# Altium schematic symbol library Deck Versal.SchLib: 25 symbols
Pins are listed as number, name and electrical type; pins without a type are passive.

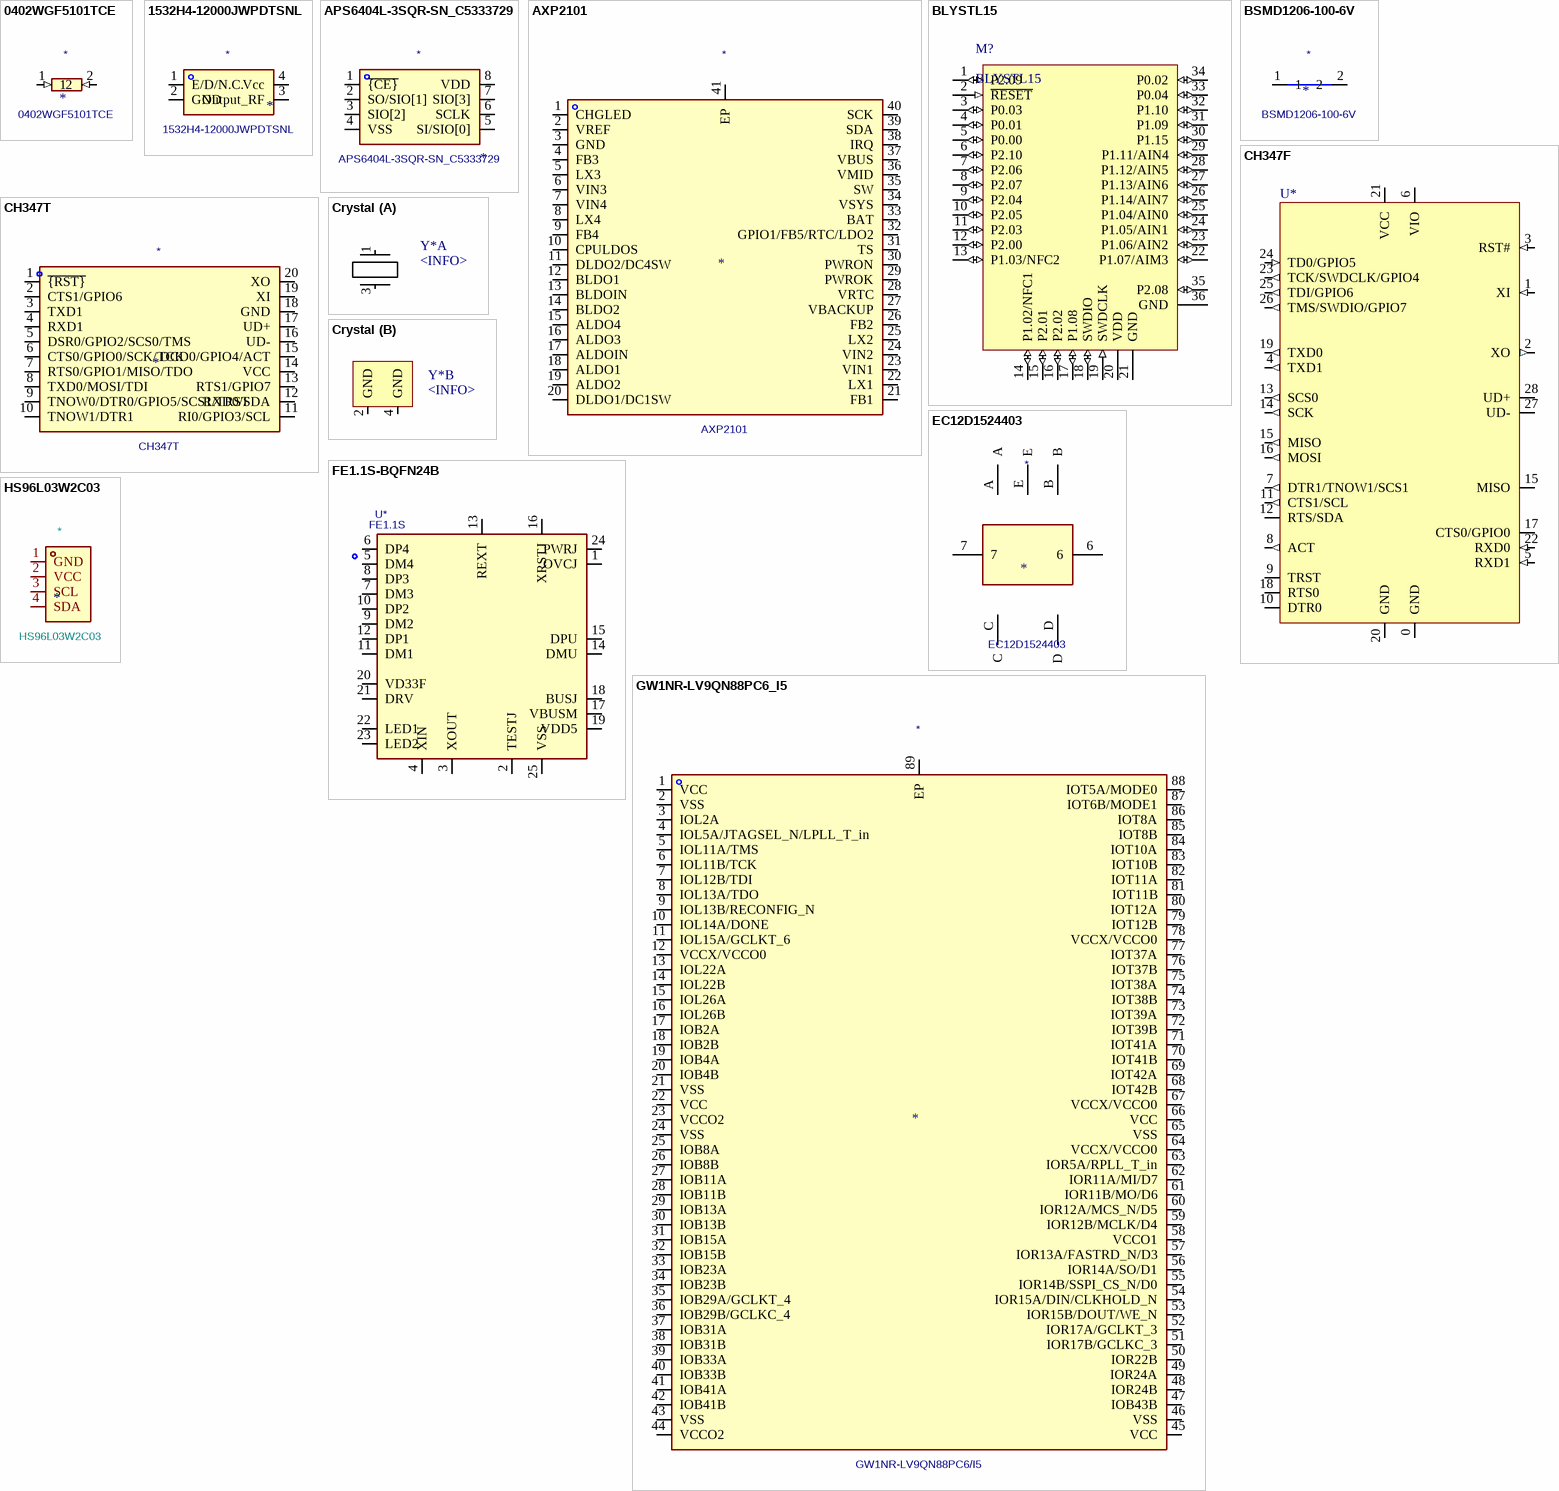
[diagram p0: symbols 0402WGF5101TCE to HS96L03W2C03]

## 0402WGF5101TCE
designator *  value 0402WGF5101TCE
Manufacturer: UNI-ROYAL(厚声); ki_keywords: Resistors; ki_description: 5.1KΩ (5101) ±1%; Footprint: easyeda2kicad:R0402; Supplier: https://lcsc.com/product-detail/Chip-Resistor-Surface-Mount-UniOhm_5-1KR-5101-1_C25905.html; MPN: 0402WGF5101TCE; LCSC Part: C25905
footprint R0402
pins: 1 (in), 2 (in)

## 1532H4-12000JWPDTSNL
designator *  value 1532H4-12000JWPDTSNL
Manufacturer: HCI(杭晶); ki_keywords: Oscillators; Footprint: easyeda2kicad:OSC-SMD_4P-L3.2-W2.5-BL; Supplier: https://www.lcsc.com/datasheet/C5383163.pdf; MPN: 1532H4-12000JWPDTSNL; LCSC Part: C5383163
footprint OSC-SMD_4P-L3.2-W2.5-BL
pins: 1 E/D/N.C., 2 GND, 3 Output_RF, 4 Vcc

## APS6404L-3SQR-SN_C5333729
designator *  value APS6404L-3SQR-SN_C5333729
Manufacturer: Apmemory; MPN: APS6404L-3SQR-SN; ki_keywords: DRAM; Footprint: easyeda2kicad:SOIC-8_L4.9-W3.9-P1.27-LS6.0-BL; Supplier: https://www.lcsc.com/datasheet/C5333729.pdf; LCSC Part: C5333729
footprint SOIC-8_L4.9-W3.9-P1.27-LS6.0-BL
pins: 1 ~{{CE}}, 2 SO/SIO[1], 3 SIO[2], 4 VSS, 5 SI/SIO[0], 6 SCLK, 7 SIO[3], 8 VDD

## AXP2101
designator *  value AXP2101
Manufacturer: x-powers(芯智汇); ki_keywords: Microcontroller Units (MCUs/MPUs/SOCs); Footprint: easyeda2kicad:QFN-40_L5.0-W5.0-P0.40-TL-EP3.4; Supplier: https://www.lcsc.com/datasheet/C3036461.pdf; MPN: AXP2101; LCSC Part: C3036461
footprint QFN-40_L5.0-W5.0-P0.40-TL-EP3.4
pins: 1 CHGLED, 2 VREF, 3 GND, 4 FB3, 5 LX3, 6 VIN3, 7 VIN4, 8 LX4, 9 FB4, 10 CPULDOS, 11 DLDO2/DC4SW, 12 BLDO1, 13 BLDOIN, 14 BLDO2, 15 ALDO4, 16 ALDO3, 17 ALDOIN, 18 ALDO1, 19 ALDO2, 20 DLDO1/DC1SW, 21 FB1, 22 LX1, 23 VIN1, 24 VIN2, 25 LX2, 26 FB2, 27 VBACKUP, 28 VRTC, 29 PWROK, 30 PWRON, 31 TS, 32 GPIO1/FB5/RTC/LDO2, 33 BAT, 34 VSYS, 35 SW, 36 VMID, 37 VBUS, 38 IRQ, 39 SDA, 40 SCK, 41 EP

## BLYSTL15
designator M?
Nordic  nRF54L15 - BLE module
footprint BLYSTL15 (nRF54L15 Bluetooth LE Module)
pins: 1 P2.09 (io), 2 ~{RESET} (in), 3 P0.03 (io), 4 P0.01 (io), 5 P0.00 (io), 6 P2.10 (io), 7 P2.06 (io), 8 P2.07 (io), 9 P2.04 (io), 10 P2.05 (io), 11 P2.03 (io), 12 P2.00 (io), 13 P1.03/NFC2 (io), 14 P1.02/NFC1 (io), 15 P2.01 (io), 16 P2.02 (io), 17 P1.08 (io), 18 SWDIO (io), 19 SWDCLK (in), 20 VDD (power), 21 GND, 22 P1.07/AIM3 (io), 23 P1.06/AIN2 (io), 24 P1.05/AIN1 (io), 25 P1.04/AIN0 (io), 26 P1.14/AIN7 (io), 27 P1.13/AIN6 (io), 28 P1.12/AIN5 (io), 29 P1.11/AIN4 (io), 30 P1.15 (io), 31 P1.09 (io), 32 P1.10 (io), 33 P0.04 (io), 34 P0.02 (io), 35 P2.08 (io), 36 GND

## BSMD1206-100-6V
designator *  value BSMD1206-100-6V
Manufacturer: BHFUSE(佰宏); ki_keywords: Resettable Fuses; Footprint: easyeda2kicad:F1206; Supplier: https://lcsc.com/product-detail/PTC-Resettable-Fuses_BHFUSE-BSMD1206-100-6V_C883129.html; MPN: BSMD1206-100-6V; LCSC Part: C883129
footprint F1206
pins: 1, 2

## CH347F
designator U*
-40℃~+85℃ 180Ω 20pF 8MHz Crystal Oscillator ±10ppm ±20ppm SMD3225-4P Crystals ROHS
footprint QFN40P400X400X80_HS-29N (QFN, 28-Leads, Body 4.00x4.00mm, Pitch 0.40mm, Thermal Pad 2.70x2.70mm, IPC Medium Density)
pins: 0 GND, 1 XI (in), 2 XO (out), 3 RST# (in), 4 TXD1 (out), 5 RXD1 (in), 6 VIO, 7 DTR1/TNOW1/SCS1 (out), 8 ACT (out), 9 TRST, 10 DTR0, 11 CTS1/SCL (out), 12 RTS/SDA (io), 13 SCS0 (out), 14 SCK (out), 15 MISO, 15 MISO (out), 16 MOSI (out), 17 CTS0/GPIO0, 18 RTS0, 19 TXD0 (out), 20 GND, 21 VCC, 22 RXD0 (in), 23 TCK/SWDCLK/GPIO4 (out), 24 TD0/GPIO5 (in), 25 TDI/GPIO6 (out), 26 TMS/SWDIO/GPIO7 (out), 27 UD-, 28 UD+

## CH347T
designator *  value CH347T
Manufacturer: WCH(南京沁恒); ki_keywords: USB ICs; Footprint: easyeda2kicad:TSSOP-20_L6.5-W4.4-P0.65-LS6.4-BL; Supplier: https://www.lcsc.com/datasheet/C5122332.pdf; MPN: CH347T; LCSC Part: C5122332
footprint TSSOP-20_L6.5-W4.4-P0.65-LS6.4-BL
pins: 1 ~{{RST}}, 2 CTS1/GPIO6, 3 TXD1, 4 RXD1, 5 DSR0/GPIO2/SCS0/TMS, 6 CTS0/GPIO0/SCK/TCK, 7 RTS0/GPIO1/MISO/TDO, 8 TXD0/MOSI/TDI, 9 TNOW0/DTR0/GPIO5/SCS1/TRST, 10 TNOW1/DTR1, 11 RI0/GPIO3/SCL, 12 RXD0/SDA, 13 RTS1/GPIO7, 14 VCC, 15 DCD0/GPIO4/ACT, 16 UD-, 17 UD+, 18 GND, 19 XI, 20 XO

## Crystal
designator Y*, comment <INFO>
footprint X32258MSB4SI (-40℃~+85℃ 180Ω 20pF 8MHz Crystal Oscillator ±10ppm ±20ppm SMD3225-4P Crystals ROHS)
part A pins: 1, 3
part B pins: 2 GND, 4 GND

## EC12D1524403
designator *  value EC12D1524403
Manufacturer: ALPSALPINE(阿尔卑斯阿尔派); ki_keywords: Rotary Encoders; Footprint: easyeda2kicad:SW-TH_EC12D1524403; Supplier: https://lcsc.com/product-detail/Coded-Rotary-Switches_ALPS_EC12D1524403_EC12D1524403_C112349.html; MPN: EC12D1524403; LCSC Part: C112349
footprint SW-TH_EC12D1524403
pins: 6, 7, A, B, C, D, E

## FE1.1S-BQFN24B
designator U*  value FE1.1S  (hidden comment: *)
Manufacturer: TERMINUS(汤铭科技); MPN: FE1.1S-BQFN24B; ki_keywords: USB ICs; Footprint: easyeda2kicad:WQFN-24_L4.0-W4.0-P0.50-TL-EP2.7; Supplier: https://www.lcsc.com/datasheet/C6776948.pdf; LCSC Part: C6776948
footprint WQFN-24_L4.0-W4.0-P0.50-TL-EP2.7
pins: 1 OVCJ, 2 TESTJ, 3 XOUT, 4 XIN, 5 DM4, 6 DP4, 7 DM3, 8 DP3, 9 DM2, 10 DP2, 11 DM1, 12 DP1, 13 REXT, 14 DMU, 15 DPU, 16 XRSTJ, 17 VBUSM, 18 BUSJ, 19 VDD5, 20 VD33F, 21 DRV, 22 LED1, 23 LED2, 24 PWRJ, 25 VSS

## GW1NR-LV9QN88PC6_I5
designator *  value GW1NR-LV9QN88PC6/I5
Manufacturer: GOWIN(高云); Footprint: easyeda2kicad:QFN-88_L10.0-W10.0-P0.40-BL-EP7.0; Supplier: https://www.lcsc.com/datasheet/C5799578.pdf; MPN: GW1NR-LV9QN88PC6/I5; LCSC Part: C5799578
footprint QFN-88_L10.0-W10.0-P0.40-BL-EP7.0
pins: 1 VCC, 2 VSS, 3 IOL2A, 4 IOL5A/JTAGSEL_N/LPLL_T_in, 5 IOL11A/TMS, 6 IOL11B/TCK, 7 IOL12B/TDI, 8 IOL13A/TDO, 9 IOL13B/RECONFIG_N, 10 IOL14A/DONE, 11 IOL15A/GCLKT_6, 12 VCCX/VCCO0, 13 IOL22A, 14 IOL22B, 15 IOL26A, 16 IOL26B, 17 IOB2A, 18 IOB2B, 19 IOB4A, 20 IOB4B, 21 VSS, 22 VCC, 23 VCCO2, 24 VSS, 25 IOB8A, 26 IOB8B, 27 IOB11A, 28 IOB11B, 29 IOB13A, 30 IOB13B, 31 IOB15A, 32 IOB15B, 33 IOB23A, 34 IOB23B, 35 IOB29A/GCLKT_4, 36 IOB29B/GCLKC_4, 37 IOB31A, 38 IOB31B, 39 IOB33A, 40 IOB33B, 41 IOB41A, 42 IOB41B, 43 VSS, 44 VCCO2, 45 VCC, 46 VSS, 47 IOB43B, 48 IOR24B, 49 IOR24A, 50 IOR22B, 51 IOR17B/GCLKC_3, 52 IOR17A/GCLKT_3, 53 IOR15B/DOUT/WE_N, 54 IOR15A/DIN/CLKHOLD_N, 55 IOR14B/SSPI_CS_N/D0, 56 IOR14A/SO/D1, 57 IOR13A/FASTRD_N/D3, 58 VCCO1, 59 IOR12B/MCLK/D4, 60 IOR12A/MCS_N/D5, 61 IOR11B/MO/D6, 62 IOR11A/MI/D7, 63 IOR5A/RPLL_T_in, 64 VCCX/VCCO0, 65 VSS, 66 VCC, 67 VCCX/VCCO0, 68 IOT42B, 69 IOT42A, 70 IOT41B, 71 IOT41A, 72 IOT39B, 73 IOT39A, 74 IOT38B, 75 IOT38A, 76 IOT37B, 77 IOT37A, 78 VCCX/VCCO0, 79 IOT12B, 80 IOT12A, 81 IOT11B, 82 IOT11A, 83 IOT10B, 84 IOT10A, 85 IOT8B, 86 IOT8A, 87 IOT6B/MODE1, 88 IOT5A/MODE0, 89 EP

## HS96L03W2C03
designator *  value HS96L03W2C03
Manufacturer: HS(汉昇); ki_keywords: OLED Displays Modules; Footprint: easyeda2kicad:OLED-TH_L27.8-W27.2-P2.54_C9900033791; Supplier: https://www.lcsc.com/datasheet/C5248080.pdf; MPN: HS96L03W2C03; LCSC Part: C5248080
footprint OLED-TH_L27.8-W27.2-P2.54_C9900033791
pins: 1 GND, 2 VCC, 3 SCL, 4 SDA

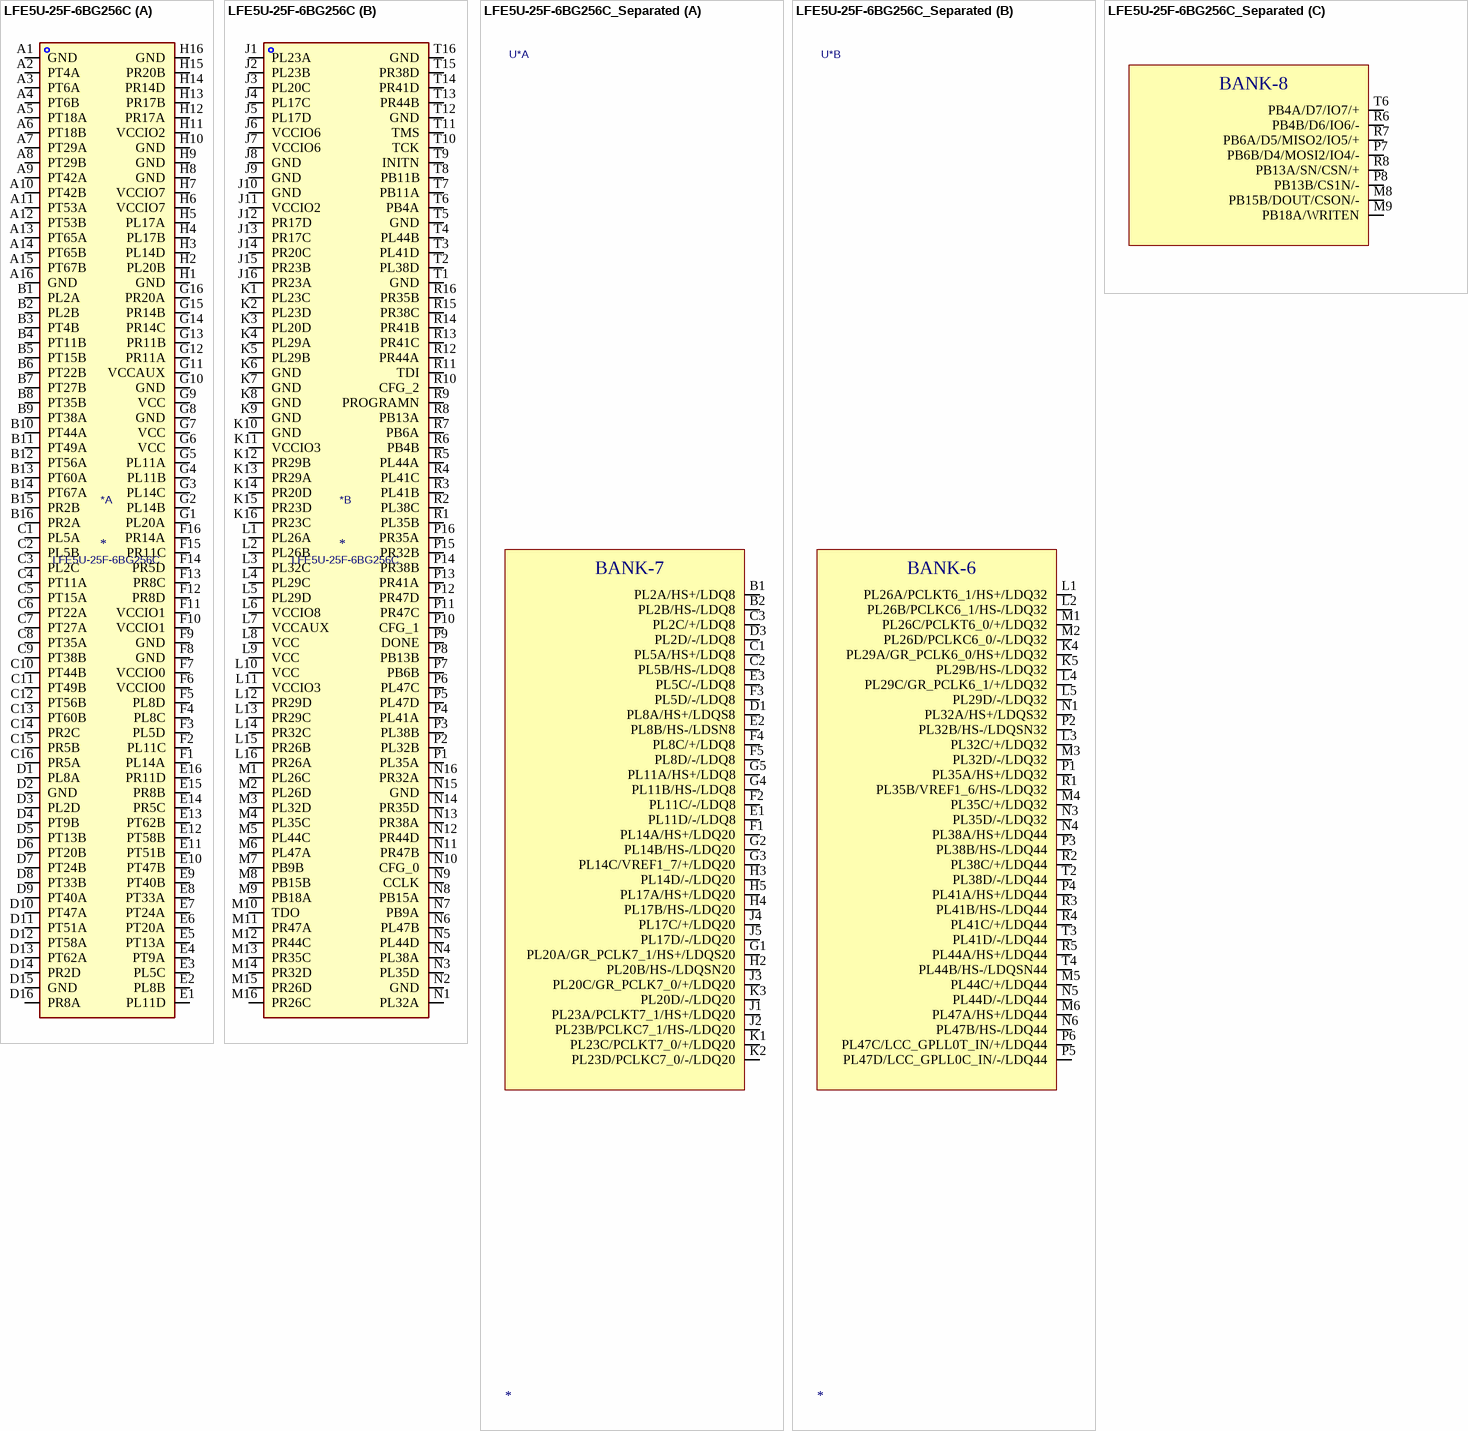
[diagram p1: symbols LFE5U-25F-6BG256C to LFE5U-25F-6BG256C_Separated]

## LFE5U-25F-6BG256C
designator *  value LFE5U-25F-6BG256C
Manufacturer: LATTICE(莱迪思); ki_keywords: CPLD/FPGA; Footprint: easyeda2kicad:CABGA-256_L14.0-W14.0-R16-C16-P0.80-TL; Supplier: https://www.lcsc.com/datasheet/C1521614.pdf; MPN: LFE5U-25F-6BG256C; LCSC Part: C1521614
footprint CABGA-256_L14.0-W14.0-R16-C16-P0.80-TL
part A pins: A1 GND, A2 PT4A, A3 PT6A, A4 PT6B, A5 PT18A, A6 PT18B, A7 PT29A, A8 PT29B, A9 PT42A, A10 PT42B, A11 PT53A, A12 PT53B, A13 PT65A, A14 PT65B, A15 PT67B, A16 GND, B1 PL2A, B2 PL2B, B3 PT4B, B4 PT11B, B5 PT15B, B6 PT22B, B7 PT27B, B8 PT35B, B9 PT38A, B10 PT44A, B11 PT49A, B12 PT56A, B13 PT60A, B14 PT67A, B15 PR2B, B16 PR2A, C1 PL5A, C2 PL5B, C3 PL2C, C4 PT11A, C5 PT15A, C6 PT22A, C7 PT27A, C8 PT35A, C9 PT38B, C10 PT44B, C11 PT49B, C12 PT56B, C13 PT60B, C14 PR2C, C15 PR5B, C16 PR5A, D1 PL8A, D2 GND, D3 PL2D, D4 PT9B, D5 PT13B, D6 PT20B, D7 PT24B, D8 PT33B, D9 PT40A, D10 PT47A, D11 PT51A, D12 PT58A, D13 PT62A, D14 PR2D, D15 GND, D16 PR8A, E1 PL11D, E2 PL8B, E3 PL5C, E4 PT9A, E5 PT13A, E6 PT20A, E7 PT24A, E8 PT33A, E9 PT40B, E10 PT47B, E11 PT51B, E12 PT58B, E13 PT62B, E14 PR5C, E15 PR8B, E16 PR11D, F1 PL14A, F2 PL11C, F3 PL5D, F4 PL8C, F5 PL8D, F6 VCCIO0, F7 VCCIO0, F8 GND, F9 GND, F10 VCCIO1, F11 VCCIO1, F12 PR8D, F13 PR8C, F14 PR5D, F15 PR11C, F16 PR14A, G1 PL20A, G2 PL14B, G3 PL14C, G4 PL11B, G5 PL11A, G6 VCC, G7 VCC, G8 GND, G9 VCC, G10 GND, G11 VCCAUX, G12 PR11A, G13 PR11B, G14 PR14C, G15 PR14B, G16 PR20A, H1 GND, H2 PL20B, H3 PL14D, H4 PL17B, H5 PL17A, H6 VCCIO7, H7 VCCIO7, H8 GND, H9 GND, H10 GND, H11 VCCIO2, H12 PR17A, H13 PR17B, H14 PR14D, H15 PR20B, H16 GND
part B pins: J1 PL23A, J2 PL23B, J3 PL20C, J4 PL17C, J5 PL17D, J6 VCCIO6, J7 VCCIO6, J8 GND, J9 GND, J10 GND, J11 VCCIO2, J12 PR17D, J13 PR17C, J14 PR20C, J15 PR23B, J16 PR23A, K1 PL23C, K2 PL23D, K3 PL20D, K4 PL29A, K5 PL29B, K6 GND, K7 GND, K8 GND, K9 GND, K10 GND, K11 VCCIO3, K12 PR29B, K13 PR29A, K14 PR20D, K15 PR23D, K16 PR23C, L1 PL26A, L2 PL26B, L3 PL32C, L4 PL29C, L5 PL29D, L6 VCCIO8, L7 VCCAUX, L8 VCC, L9 VCC, L10 VCC, L11 VCCIO3, L12 PR29D, L13 PR29C, L14 PR32C, L15 PR26B, L16 PR26A, M1 PL26C, M2 PL26D, M3 PL32D, M4 PL35C, M5 PL44C, M6 PL47A, M7 PB9B, M8 PB15B, M9 PB18A, M10 TDO, M11 PR47A, M12 PR44C, M13 PR35C, M14 PR32D, M15 PR26D, M16 PR26C, N1 PL32A, N2 GND, N3 PL35D, N4 PL38A, N5 PL44D, N6 PL47B, N7 PB9A, N8 PB15A, N9 CCLK, N10 CFG_0, N11 PR47B, N12 PR44D, N13 PR38A, N14 PR35D, N15 GND, N16 PR32A, P1 PL35A, P2 PL32B, P3 PL38B, P4 PL41A, P5 PL47D, P6 PL47C, P7 PB6B, P8 PB13B, P9 DONE, P10 CFG_1, P11 PR47C, P12 PR47D, P13 PR41A, P14 PR38B, P15 PR32B, P16 PR35A, R1 PL35B, R2 PL38C, R3 PL41B, R4 PL41C, R5 PL44A, R6 PB4B, R7 PB6A, R8 PB13A, R9 PROGRAMN, R10 CFG_2, R11 TDI, R12 PR44A, R13 PR41C, R14 PR41B, R15 PR38C, R16 PR35B, T1 GND, T2 PL38D, T3 PL41D, T4 PL44B, T5 GND, T6 PB4A, T7 PB11A, T8 PB11B, T9 INITN, T10 TCK, T11 TMS, T12 GND, T13 PR44B, T14 PR41D, T15 PR38D, T16 GND

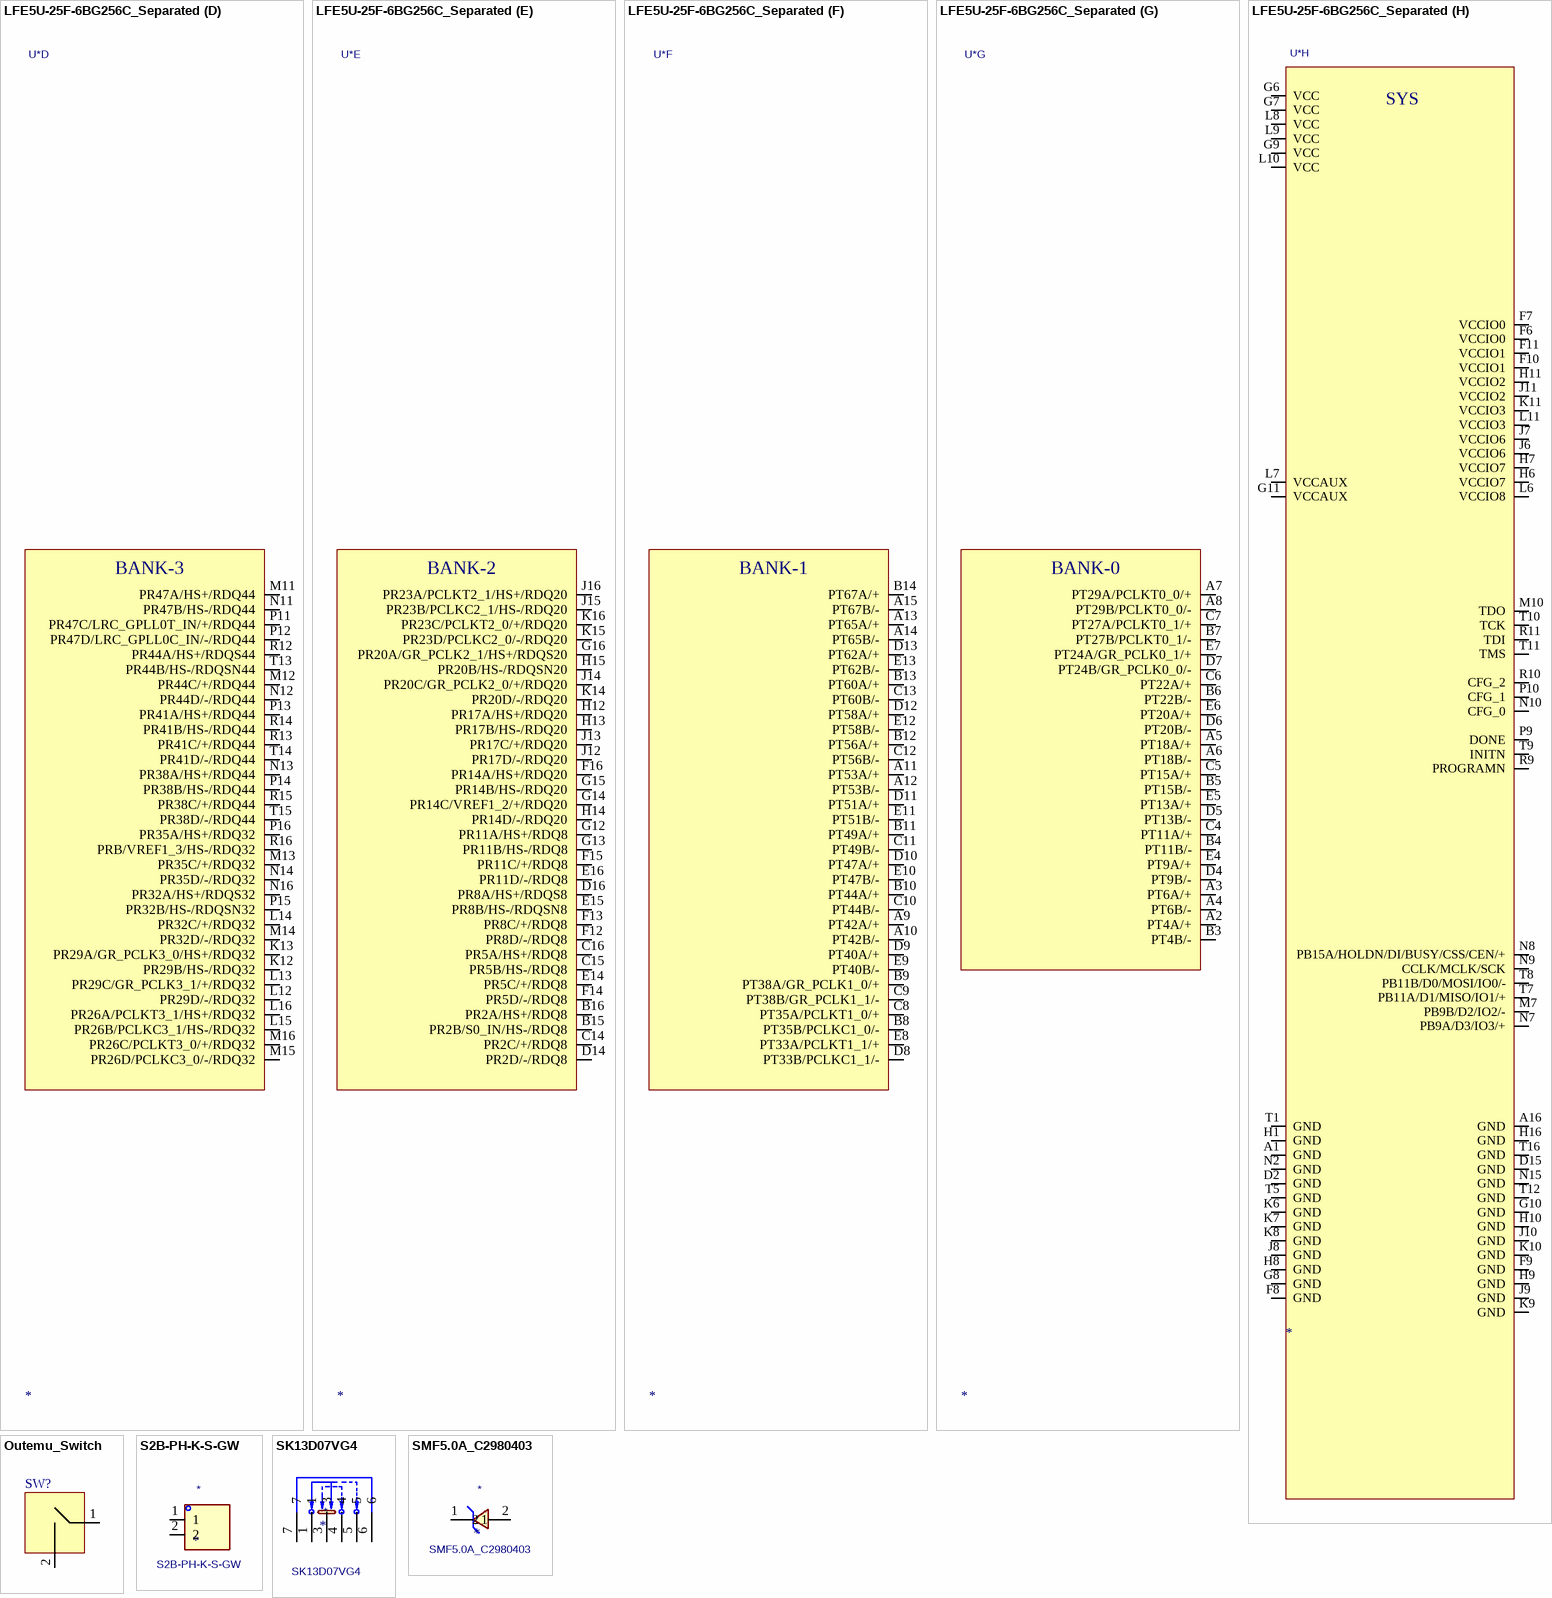
[diagram p2: symbols LFE5U-25F-6BG256C_Separated to SMF5.0A_C2980403]

## LFE5U-25F-6BG256C_Separated
designator U*
Manufacturer: LATTICE(莱迪思); MPN: LFE5U-25F-6BG256C; ki_keywords: CPLD/FPGA; Footprint: easyeda2kicad:CABGA-256_L14.0-W14.0-R16-C16-P0.80-TL; Supplier: https://www.lcsc.com/datasheet/C1521614.pdf; LCSC Part: C1521614
footprint CABGA-256_L14.0-W14.0-R16-C16-P0.80-TL
part A pins: B1 PL2A/HS+/LDQ8, B2 PL2B/HS-/LDQ8, C1 PL5A/HS+/LDQ8, C2 PL5B/HS-/LDQ8, C3 PL2C/+/LDQ8, D1 PL8A/HS+/LDQS8, D3 PL2D/-/LDQ8, E1 PL11D/-/LDQ8, E2 PL8B/HS-/LDSN8, E3 PL5C/-/LDQ8, F1 PL14A/HS+/LDQ20, F2 PL11C/-/LDQ8, F3 PL5D/-/LDQ8, F4 PL8C/+/LDQ8, F5 PL8D/-/LDQ8, G1 PL20A/GR_PCLK7_1/HS+/LDQS20, G2 PL14B/HS-/LDQ20, G3 PL14C/VREF1_7/+/LDQ20, G4 PL11B/HS-/LDQ8, G5 PL11A/HS+/LDQ8, H2 PL20B/HS-/LDQSN20, H3 PL14D/-/LDQ20, H4 PL17B/HS-/LDQ20, H5 PL17A/HS+/LDQ20, J1 PL23A/PCLKT7_1/HS+/LDQ20, J2 PL23B/PCLKC7_1/HS-/LDQ20, J3 PL20C/GR_PCLK7_0/+/LDQ20, J4 PL17C/+/LDQ20, J5 PL17D/-/LDQ20, K1 PL23C/PCLKT7_0/+/LDQ20, K2 PL23D/PCLKC7_0/-/LDQ20, K3 PL20D/-/LDQ20
part B pins: K4 PL29A/GR_PCLK6_0/HS+/LDQ32, K5 PL29B/HS-/LDQ32, L1 PL26A/PCLKT6_1/HS+/LDQ32, L2 PL26B/PCLKC6_1/HS-/LDQ32, L3 PL32C/+/LDQ32, L4 PL29C/GR_PCLK6_1/+/LDQ32, L5 PL29D/-/LDQ32, M1 PL26C/PCLKT6_0/+/LDQ32, M2 PL26D/PCLKC6_0/-/LDQ32, M3 PL32D/-/LDQ32, M4 PL35C/+/LDQ32, M5 PL44C/+/LDQ44, M6 PL47A/HS+/LDQ44, N1 PL32A/HS+/LDQS32, N3 PL35D/-/LDQ32, N4 PL38A/HS+/LDQ44, N5 PL44D/-/LDQ44, N6 PL47B/HS-/LDQ44, P1 PL35A/HS+/LDQ32, P2 PL32B/HS-/LDQSN32, P3 PL38B/HS-/LDQ44, P4 PL41A/HS+/LDQ44, P5 PL47D/LCC_GPLL0C_IN/-/LDQ44, P6 PL47C/LCC_GPLL0T_IN/+/LDQ44, R1 PL35B/VREF1_6/HS-/LDQ32, R2 PL38C/+/LDQ44, R3 PL41B/HS-/LDQ44, R4 PL41C/+/LDQ44, R5 PL44A/HS+/LDQ44, T2 PL38D/-/LDQ44, T3 PL41D/-/LDQ44, T4 PL44B/HS-/LDQSN44
part C pins: M8 PB15B/DOUT/CSON/-, M9 PB18A/WRITEN, P7 PB6B/D4/MOSI2/IO4/-, P8 PB13B/CS1N/-, R6 PB4B/D6/IO6/-, R7 PB6A/D5/MISO2/IO5/+, R8 PB13A/SN/CSN/+, T6 PB4A/D7/IO7/+
part D pins: K12 PR29B/HS-/RDQ32, K13 PR29A/GR_PCLK3_0/HS+/RDQ32, L12 PR29D/-/RDQ32, L13 PR29C/GR_PCLK3_1/+/RDQ32, L14 PR32C/+/RDQ32, L15 PR26B/PCLKC3_1/HS-/RDQ32, L16 PR26A/PCLKT3_1/HS+/RDQ32, M11 PR47A/HS+/RDQ44, M12 PR44C/+/RDQ44, M13 PR35C/+/RDQ32, M14 PR32D/-/RDQ32, M15 PR26D/PCLKC3_0/-/RDQ32, M16 PR26C/PCLKT3_0/+/RDQ32, N11 PR47B/HS-/RDQ44, N12 PR44D/-/RDQ44, N13 PR38A/HS+/RDQ44, N14 PR35D/-/RDQ32, N16 PR32A/HS+/RDQS32, P11 PR47C/LRC_GPLL0T_IN/+/RDQ44, P12 PR47D/LRC_GPLL0C_IN/-/RDQ44, P13 PR41A/HS+/RDQ44, P14 PR38B/HS-/RDQ44, P15 PR32B/HS-/RDQSN32, P16 PR35A/HS+/RDQ32, R12 PR44A/HS+/RDQS44, R13 PR41C/+/RDQ44, R14 PR41B/HS-/RDQ44, R15 PR38C/+/RDQ44, R16 PRB/VREF1_3/HS-/RDQ32, T13 PR44B/HS-/RDQSN44, T14 PR41D/-/RDQ44, T15 PR38D/-/RDQ44
part E pins: B15 PR2B/S0_IN/HS-/RDQ8, B16 PR2A/HS+/RDQ8, C14 PR2C/+/RDQ8, C15 PR5B/HS-/RDQ8, C16 PR5A/HS+/RDQ8, D14 PR2D/-/RDQ8, D16 PR8A/HS+/RDQS8, E14 PR5C/+/RDQ8, E15 PR8B/HS-/RDQSN8, E16 PR11D/-/RDQ8, F12 PR8D/-/RDQ8, F13 PR8C/+/RDQ8, F14 PR5D/-/RDQ8, F15 PR11C/+/RDQ8, F16 PR14A/HS+/RDQ20, G12 PR11A/HS+/RDQ8, G13 PR11B/HS-/RDQ8, G14 PR14C/VREF1_2/+/RDQ20, G15 PR14B/HS-/RDQ20, G16 PR20A/GR_PCLK2_1/HS+/RDQS20, H12 PR17A/HS+/RDQ20, H13 PR17B/HS-/RDQ20, H14 PR14D/-/RDQ20, H15 PR20B/HS-/RDQSN20, J12 PR17D/-/RDQ20, J13 PR17C/+/RDQ20, J14 PR20C/GR_PCLK2_0/+/RDQ20, J15 PR23B/PCLKC2_1/HS-/RDQ20, J16 PR23A/PCLKT2_1/HS+/RDQ20, K14 PR20D/-/RDQ20, K15 PR23D/PCLKC2_0/-/RDQ20, K16 PR23C/PCLKT2_0/+/RDQ20
part F pins: A9 PT42A/+, A10 PT42B/-, A11 PT53A/+, A12 PT53B/-, A13 PT65A/+, A14 PT65B/-, A15 PT67B/-, B8 PT35B/PCLKC1_0/-, B9 PT38A/GR_PCLK1_0/+, B10 PT44A/+, B11 PT49A/+, B12 PT56A/+, B13 PT60A/+, B14 PT67A/+, C8 PT35A/PCLKT1_0/+, C9 PT38B/GR_PCLK1_1/-, C10 PT44B/-, C11 PT49B/-, C12 PT56B/-, C13 PT60B/-, D8 PT33B/PCLKC1_1/-, D9 PT40A/+, D10 PT47A/+, D11 PT51A/+, D12 PT58A/+, D13 PT62A/+, E8 PT33A/PCLKT1_1/+, E9 PT40B/-, E10 PT47B/-, E11 PT51B/-, E12 PT58B/-, E13 PT62B/-
part G pins: A2 PT4A/+, A3 PT6A/+, A4 PT6B/-, A5 PT18A/+, A6 PT18B/-, A7 PT29A/PCLKT0_0/+, A8 PT29B/PCLKT0_0/-, B3 PT4B/-, B4 PT11B/-, B5 PT15B/-, B6 PT22B/-, B7 PT27B/PCLKT0_1/-, C4 PT11A/+, C5 PT15A/+, C6 PT22A/+, C7 PT27A/PCLKT0_1/+, D4 PT9B/-, D5 PT13B/-, D6 PT20B/-, D7 PT24B/GR_PCLK0_0/-, E4 PT9A/+, E5 PT13A/+, E6 PT20A/+, E7 PT24A/GR_PCLK0_1/+
part H pins: A1 GND, A16 GND, D2 GND, D15 GND, F6 VCCIO0, F7 VCCIO0, F8 GND, F9 GND, F10 VCCIO1, F11 VCCIO1, G6 VCC, G7 VCC, G8 GND, G9 VCC, G10 GND, G11 VCCAUX, H1 GND, H6 VCCIO7, H7 VCCIO7, H8 GND, H9 GND, H10 GND, H11 VCCIO2, H16 GND, J6 VCCIO6, J7 VCCIO6, J8 GND, J9 GND, J10 GND, J11 VCCIO2, K6 GND, K7 GND, K8 GND, K9 GND, K10 GND, K11 VCCIO3, L6 VCCIO8, L7 VCCAUX, L8 VCC, L9 VCC, L10 VCC, L11 VCCIO3, M7 PB9B/D2/IO2/-, M10 TDO, N2 GND, N7 PB9A/D3/IO3/+, N8 PB15A/HOLDN/DI/BUSY/CSS/CEN/+, N9 CCLK/MCLK/SCK, N10 CFG_0, N15 GND, P9 DONE, P10 CFG_1, R9 PROGRAMN, R10 CFG_2, R11 TDI, T1 GND, T5 GND, T7 PB11A/D1/MISO/IO1/+, T8 PB11B/D0/MOSI/IO0/-, T9 INITN, T10 TCK, T11 TMS, T12 GND, T16 GND
part A text: BANK-7
part B text: BANK-6
part C text: BANK-8
part D text: BANK-3
part E text: BANK-2
part F text: BANK-1
part G text: BANK-0
part H text: SYS

## Outemu_Switch
designator SW?  (value not drawn)
footprint SW_Cherry_MX_PCB_1.00u
pins: 1, 2

## S2B-PH-K-S-GW
designator *  value S2B-PH-K-S-GW
Manufacturer: JST; ki_keywords: Wire To Board / Wire To Wire Connector; Footprint: easyeda2kicad:CONN-TH_S2B-PH-K-S-GW; Supplier: https://lcsc.com/product-detail/PH-Connectors_JST_S2B-PH-K-S-GW_PHsocket-1-2P-Curved-needle-pitch2mm_C157932.html; MPN: S2B-PH-K-S-GW; LCSC Part: C157932
footprint CONN-TH_S2B-PH-K-S-GW
pins: 1, 2

## SK13D07VG4
designator *  value SK13D07VG4
Manufacturer: SHOU HAN(首韩); ki_keywords: Slide Switches; Footprint: easyeda2kicad:SW-TH_SK13D07VG4; Supplier: https://www.lcsc.com/datasheet/C2681581.pdf; MPN: SK13D07VG4; LCSC Part: C2681581
footprint SW-TH_SK13D07VG4
pins: 1, 3, 4, 5, 6, 7

## SMF5.0A_C2980403
designator *  value SMF5.0A_C2980403
Manufacturer: GOODWORK(固得沃克); MPN: SMF5.0A; ki_keywords: TVS; Footprint: easyeda2kicad:SOD-123FL_L2.8-W1.7-LS3.6-RD; Supplier: https://www.lcsc.com/datasheet/C2980403.pdf; LCSC Part: C2980403
footprint SOD-123FL_L2.8-W1.7-LS3.6-RD
pins: 1, 2

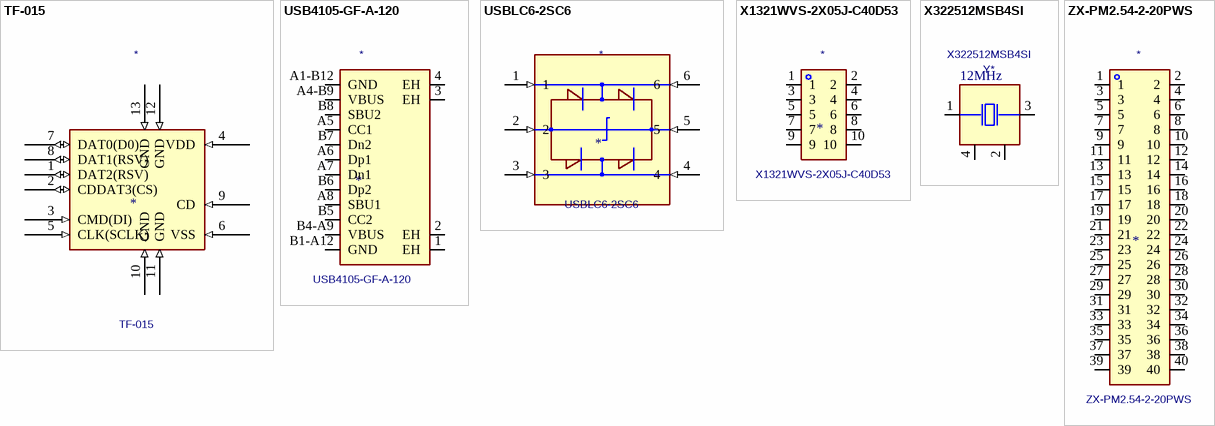
[diagram p3: symbols TF-015 to ZX-PM2.54-2-20PWS]

## TF-015
designator *  value TF-015
Manufacturer: SOFNG(硕方); ki_keywords: SIM Card Connectors; Footprint: easyeda2kicad:TF-SMD_TF-015; Supplier: https://lcsc.com/product-detail/Card-Sockets_TF-015_C113206.html; MPN: TF-015; LCSC Part: C113206
footprint TF-SMD_TF-015
pins: 1 DAT2(RSV) (io), 2 CDDAT3(CS) (io), 3 CMD(DI) (in), 4 VDD (in), 5 CLK(SCLK) (in), 6 VSS (in), 7 DAT0(D0) (io), 8 DAT1(RSV) (io), 9 CD (in), 10 GND (in), 11 GND (in), 12 GND (in), 13 GND (in)

## USB4105-GF-A-120
designator *  value USB4105-GF-A-120
Manufacturer: GCT; Footprint: easyeda2kicad:USB-C-SMD_MC-311D; Supplier: https://www.lcsc.com/datasheet/C5184243.pdf; MPN: USB4105-GF-A-120; LCSC Part: C5184243
footprint USB-C-SMD_MC-311D
pins: 1 EH, 2 EH, 3 EH, 4 EH, A1-B12 GND, A4-B9 VBUS, A5 CC1, A6 Dp1, A7 Dn1, A8 SBU1, B1-A12 GND, B4-A9 VBUS, B5 CC2, B6 Dp2, B7 Dn2, B8 SBU2

## USBLC6-2SC6
designator *  value USBLC6-2SC6
Manufacturer: ST(意法半导体); ki_keywords: ESD Protection Devices; Footprint: easyeda2kicad:SOT-23-6_L2.9-W1.6-P0.95-LS2.8-BL; Supplier: https://lcsc.com/product-detail/Diodes-ESD_STMicroelectronics_USBLC6-2SC6_USBLC6-2SC6_C7519.html; MPN: USBLC6-2SC6; LCSC Part: C7519; ki_description: USBLC6-2SC6
footprint SOT-23-6_L2.9-W1.6-P0.95-LS2.8-BL
pins: 1 (in), 2 (in), 3 (in), 4 (in), 5 (in), 6 (in)

## X1321WVS-2X05J-C40D53
designator *  value X1321WVS-2X05J-C40D53
Manufacturer: XKB Connection(中国星坤); ki_keywords: Pin Headers; Footprint: easyeda2kicad:HDR-SMD_10P-P1.27-V-M-C2-C5-LS5.3; Supplier: https://www.lcsc.com/datasheet/C2881910.pdf; MPN: X1321WVS-2x05J-C40D53; LCSC Part: C2881910
footprint HDR-SMD_10P-P1.27-V-M-C2-C5-LS5.3
pins: 1, 2, 3, 4, 5, 6, 7, 8, 9, 10

## X322512MSB4SI
designator Y*, comment 12MHz  value X322512MSB4SI
Manufacturer: YXC(扬兴晶振); ki_keywords: Crystals; ki_description: YSX321SL 12MHZ 20PF 10PPM -40~+85℃; Footprint: easyeda2kicad:CRYSTAL-SMD_4P-L3.2-W2.5-BL; Supplier: https://lcsc.com/product-detail/SMD-Crystals_YSX321SL-12MHZ-20PF-10PPM-40-85_C9002.html; MPN: X322512MSB4SI; LCSC Part: C9002
footprint CRYSTAL-SMD_4P-L3.2-W2.5-BL
pins: 1 OSC1, 2 GND, 3 OSC2, 4 GND

## ZX-PM2.54-2-20PWS
designator *  value ZX-PM2.54-2-20PWS
Manufacturer: Megastar(兆星); Footprint: easyeda2kicad:HDR-TH_40P-P2.54-H-F-R2-C20-S2.54-W8.5_1; Supplier: https://www.lcsc.com/datasheet/C49326201.pdf; MPN: ZX-PM2.54-2-20PWS; LCSC Part: C49326201
footprint HDR-TH_40P-P2.54-H-F-R2-C20-S2.54-W8.5_1
pins: 1, 2, 3, 4, 5, 6, 7, 8, 9, 10, 11, 12, 13, 14, 15, 16, 17, 18, 19, 20, 21, 22, 23, 24, 25, 26, 27, 28, 29, 30, 31, 32, 33, 34, 35, 36, 37, 38, 39, 40